# Altium schematic symbol library 1N4148WS_C2128.SchLib: 1 symbol
Pins are listed as number, name and electrical type; pins without a type are passive.

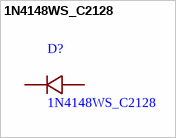
[diagram p0: symbol 1N4148WS_C2128]

## 1N4148WS_C2128
designator D?
丝印T4 100V 150mA / 二极管配置:独立式 / 整流电流:150mA / 直流反向耐压(Vr):100V / 正向压降(Vf):1.25V@150mA / 反向恢复时间(Trr):4ns / 型号:1N4148WS_C2128 / LCSC C2128 / 厂牌:CJ(江苏长电/长晶)
footprint SOD-323_L1.8-W1.3-LS2.5-RD (PCB footprint)
pins: 1 K, 2 A